# Altium schematic symbol library Crystal4pin3225.SchLib: 1 symbol
Pins are listed as number, name and electrical type; pins without a type are passive.

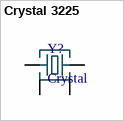
[diagram p0: symbol Crystal 3225]

## Crystal 3225
designator Y?, comment Crystal
Crystal 4pin 3225 / 12MHz ±20ppm Crystal 8pF 100 Ohms 4-SMD, No Lead; MF: ECS Inc.; MP: ECS-120-8-33-JGN-TR; Value: *; Price: None; SnapEDA_Link: https://www.snapeda.com/parts/ECS-120-8-33-JGN-TR/ECS%20Inc./view-part/2121201/?ref=snap; Package: SMD-4 ECS International; Availability: Unavailable
footprint Crystal 3225 (Crystal 4pin 3225)
pins: 1, 2, 3, 4